# Altium footprint library SYNCBOX_TST.PcbLib: 267 footprints (part 4 of 17)
Each footprint in its own frame and in the unit in brackets; x right, y up, seen from the top. Pads: shape width x height; smd on the part's side, far side on the other; paste and mask are expansions set on the pad; w line width, h text height; cw(c..) or ccw(c..) is an arc to the next point about the centre after c.
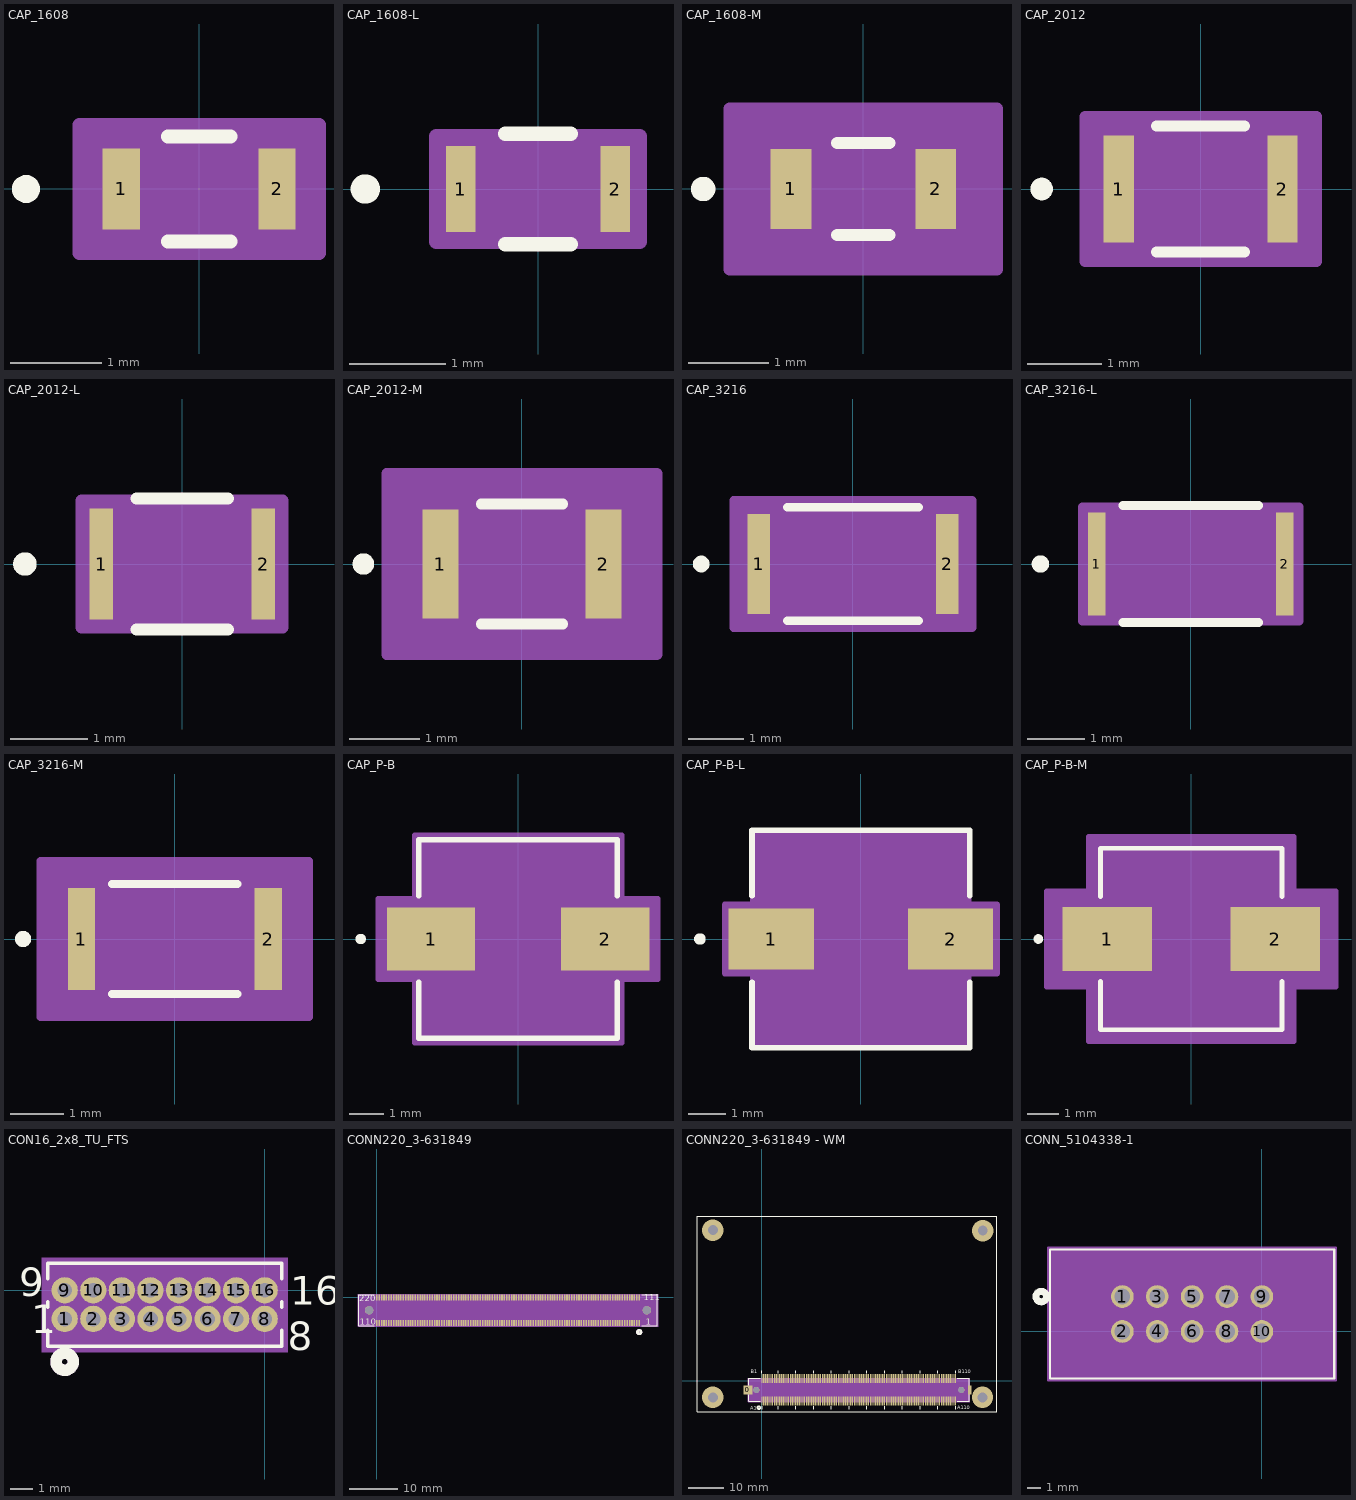
[diagram p3: the footprints below, top view; thin cyan lines are the x and y axes]

## CAP_1608 [mil]
pads (2):
  rect 16x35 smd paste+0 mask+0: 1(-33.5,0) 2(33.5,0)
Top Overlay:
  circle w6: c-74.5,0 r3
  lines w6: -13.39,-22.5 13.39,-22.5 ; -13.39,22.5 13.39,22.5
Mechanical 13:
  circle w0: c-28.5,0 r3
  lines w1: -33.5,-17.5 -33.5,17.5 ; -33.5,-17.5 33.5,-17.5 ; -33.5,-17.5 -25.5,-17.5 -25.5,17.5 -33.5,17.5 ; -33.5,-17.5 -33.5,17.5 ; -33.5,17.5 33.5,17.5 ; 33.5,-17.5 33.5,17.5 ; 33.5,-17.5 33.5,17.5 ; 33.5,-17.5 25.5,-17.5 25.5,17.5 33.5,17.5
Mechanical 15:
  region: 51.5,-27.5 -51.5,-27.5 -51.5,27.5 51.5,27.5
  lines w6: -51.5,-27.5 51.5,-27.5 51.5,27.5 -51.5,27.5 -51.5,-27.5
3D body: height 10, standoff 0, extent 0,0 10,10
3D body "CAP_1608.stp": height 35, standoff 0, extent -33.5,-17.48 33.5,17.48

## CAP_1608-L [mil]
pads (2):
  rect 12x35 smd paste+0 mask+0: 1(-31.5,0) 2(31.5,0)
Top Overlay:
  circle w6: c-70.5,0 r3
  lines w6: -13.39,-22.5 13.39,-22.5 ; -13.39,22.5 13.39,22.5
Mechanical 13:
  circle w0: c-26.5,0 r3
  lines w1: -33.5,-17.5 -33.5,17.5 ; -33.5,-17.5 -25.5,-17.5 -25.5,17.5 -33.5,17.5 ; -33.5,-17.5 33.5,-17.5 ; -33.5,-17.5 -33.5,17.5 ; -33.5,17.5 33.5,17.5 ; 33.5,-17.5 25.5,-17.5 25.5,17.5 33.5,17.5 ; 33.5,-17.5 33.5,17.5 ; 33.5,-17.5 33.5,17.5
Mechanical 15:
  region: 41.5,-21.5 -41.5,-21.5 -41.5,21.5 41.5,21.5
  lines w6: -41.5,-21.5 -41.5,21.5 41.5,21.5 41.5,-21.5 -41.5,-21.5
3D body "CAP_1608-L.stp": height 35, standoff 0, extent -33.5,-17.48 33.51,17.48
3D body: height 10, standoff 0, extent 0,0 10,10

## CAP_1608-M [mil]
pads (2):
  rect 20x39 smd paste+0 mask+0: 1(-35.5,0) 2(35.5,0)
Top Overlay:
  circle w6: c-78.5,0 r3
  lines w6: -12.75,-22.5 12.75,-22.5 ; -12.75,22.5 12.75,22.5
Mechanical 13:
  circle w0: c-30.5,0 r3
  lines w1: -33.5,-17.5 -33.5,17.5 ; -33.5,-17.5 -25.5,-17.5 -25.5,17.5 -33.5,17.5 ; -33.5,-17.5 33.5,-17.5 ; -33.5,-17.5 -33.5,17.5 ; -33.5,17.5 33.5,17.5 ; 33.5,-17.5 25.5,-17.5 25.5,17.5 33.5,17.5 ; 33.5,-17.5 33.5,17.5 ; 33.5,-17.5 33.5,17.5
Mechanical 15:
  region: 65.5,-39.5 -65.5,-39.5 -65.5,39.5 65.5,39.5
  lines w6: -65.5,-39.5 -65.5,39.5 65.5,39.5 65.5,-39.5 -65.5,-39.5
3D body "CAP_1608-M.stp": height 35, standoff 0, extent -33.5,-17.48 33.51,17.48
3D body: height 10, standoff 0, extent 0,0 10,10

## CAP_2012 [mil]
pads (2):
  rect 16x57 smd paste+0 mask+0: 1(-43.5,0) 2(43.5,0)
Top Overlay:
  circle w6: c-84.5,0 r3
  lines w6: -23.39,-33.5 23.39,-33.5 ; -23.39,33.5 23.39,33.5
Mechanical 13:
  circle w0: c-38.5,0 r3
  lines w1: -43.5,-28.5 -43.5,28.5 ; -43.5,-28.5 43.5,-28.5 ; -43.5,-28.5 -35.5,-28.5 -35.5,28.5 -43.5,28.5 ; -43.5,-28.5 -43.5,28.5 ; -43.5,28.5 43.5,28.5 ; 43.5,-28.5 43.5,28.5 ; 43.5,-28.5 43.5,28.5 ; 43.5,-28.5 35.5,-28.5 35.5,28.5 43.5,28.5
Mechanical 15:
  region: 61.5,-38.5 -61.5,-38.5 -61.5,38.5 61.5,38.5
  lines w6: -61.5,-38.5 61.5,-38.5 61.5,38.5 -61.5,38.5 -61.5,-38.5
3D body "CAP_2012.stp": height 49.02, standoff 0, extent -43.5,-28.5 43.5,28.5
3D body: height 10, standoff 0, extent 0,0 10,10

## CAP_2012-L [mil]
pads (2):
  rect 12x57 smd paste+0 mask+0: 1(-41.5,0) 2(41.5,0)
Top Overlay:
  circle w6: c-80.5,0 r3
  lines w6: -23.39,-33.5 23.39,-33.5 ; -23.39,33.5 23.39,33.5
Mechanical 13:
  circle w0: c-36.5,0 r3
  lines w1: -43.5,-28.5 -43.5,28.5 ; -43.5,-28.5 -35.5,-28.5 -35.5,28.5 -43.5,28.5 ; -43.5,-28.5 43.5,-28.5 ; -43.5,-28.5 -43.5,28.5 ; -43.5,28.5 43.5,28.5 ; 43.5,-28.5 35.5,-28.5 35.5,28.5 43.5,28.5 ; 43.5,-28.5 43.5,28.5 ; 43.5,-28.5 43.5,28.5
Mechanical 15:
  region: 51.5,-32.5 -51.5,-32.5 -51.5,32.5 51.5,32.5
  lines w6: -51.5,-32.5 -51.5,32.5 51.5,32.5 51.5,-32.5 -51.5,-32.5
3D body: height 10, standoff 0, extent 0,0 10,10
3D body "CAP_2012-L.stp": height 49.02, standoff 0, extent -43.5,-28.5 43.51,28.51

## CAP_2012-M [mil]
pads (2):
  rect 20x61 smd paste+0 mask+0: 1(-45.5,0) 2(45.5,0)
Top Overlay:
  circle w6: c-88.5,0 r3
  lines w6: -22.75,-33.5 22.75,-33.5 ; -22.75,33.5 22.75,33.5
Mechanical 13:
  circle w0: c-40.5,0 r3
  lines w1: -43.5,-28.5 -43.5,28.5 ; -43.5,-28.5 -35.5,-28.5 -35.5,28.5 -43.5,28.5 ; -43.5,-28.5 43.5,-28.5 ; -43.5,-28.5 -43.5,28.5 ; -43.5,28.5 43.5,28.5 ; 43.5,-28.5 35.5,-28.5 35.5,28.5 43.5,28.5 ; 43.5,-28.5 43.5,28.5 ; 43.5,-28.5 43.5,28.5
Mechanical 15:
  region: 75.5,-50.5 -75.5,-50.5 -75.5,50.5 75.5,50.5
  lines w6: -75.5,-50.5 -75.5,50.5 75.5,50.5 75.5,-50.5 -75.5,-50.5
3D body: height 10, standoff 0, extent 0,0 10,10
3D body "CAP_2012-M.stp": height 49.02, standoff 0, extent -43.5,-28.5 43.51,28.51

## CAP_3216 [mil]
pads (2):
  rect 16x71 smd paste+0 mask+0: 1(-67,0) 2(67,0)
Top Overlay:
  circle w6: c-108,0 r3
  lines w6: -46.89,-40.5 46.89,-40.5 ; -46.89,40.5 46.89,40.5
Mechanical 13:
  circle w0: c-62,0 r3
  lines w1: -67,-35.5 -67,35.5 ; -67,-35.5 67,-35.5 ; -67,-35.5 -59,-35.5 -59,35.5 -67,35.5 ; -67,-35.5 -67,35.5 ; -67,35.5 67,35.5 ; 67,-35.5 67,35.5 ; 67,-35.5 67,35.5 ; 67,-35.5 59,-35.5 59,35.5 67,35.5
Mechanical 15:
  region: 85,-45.5 -85,-45.5 -85,45.5 85,45.5
  lines w6: -85,-45.5 85,-45.5 85,45.5 -85,45.5 -85,-45.5
3D body "CAP_3216.stp": height 49.02, standoff 0, extent -67,-35.51 67.01,35.51
3D body: height 10, standoff 0, extent 0,0 10,10

## CAP_3216-L [mil]
pads (2):
  rect 12x71 smd paste+0 mask+0: 1(-65,0) 2(65,0)
Top Overlay:
  circle w6: c-104,0 r3
  lines w6: -46.89,-40.5 46.89,-40.5 ; -46.89,40.5 46.89,40.5
Mechanical 13:
  circle w0: c-60,0 r3
  lines w1: -67,-35.5 -67,35.5 ; -67,-35.5 67,-35.5 ; -67,-35.5 -59,-35.5 -59,35.5 -67,35.5 ; -67,-35.5 -67,35.5 ; -67,35.5 67,35.5 ; 67,-35.5 67,35.5 ; 67,-35.5 67,35.5 ; 67,-35.5 59,-35.5 59,35.5 67,35.5
Mechanical 15:
  region: 75,-39.5 -75,-39.5 -75,39.5 75,39.5
  lines w6: -75,-39.5 75,-39.5 75,39.5 -75,39.5 -75,-39.5
3D body "CAP_3216-L.stp": height 49.02, standoff 0, extent -67,-35.51 67.01,35.51
3D body: height 10, standoff 0, extent 0,0 10,10

## CAP_3216-M [mil]
pads (2):
  rect 20x75 smd paste+0 mask+0: 1(-69,0) 2(69,0)
Top Overlay:
  circle w6: c-112,0 r3
  lines w6: -46.25,-40.5 46.25,-40.5 ; -46.25,40.5 46.25,40.5
Mechanical 13:
  circle w0: c-64,0 r3
  lines w1: -67,-35.5 -67,35.5 ; -67,-35.5 67,-35.5 ; -67,-35.5 -59,-35.5 -59,35.5 -67,35.5 ; -67,-35.5 -67,35.5 ; -67,35.5 67,35.5 ; 67,-35.5 67,35.5 ; 67,-35.5 67,35.5 ; 67,-35.5 59,-35.5 59,35.5 67,35.5
Mechanical 15:
  region: 99,-57.5 -99,-57.5 -99,57.5 99,57.5
  lines w6: -99,-57.5 99,-57.5 99,57.5 -99,57.5 -99,-57.5
3D body: height 10, standoff 0, extent 0,0 10,10
3D body "CAP_3216-M.stp": height 49.02, standoff 0, extent -67,-35.51 67.01,35.51

## CAP_P-B [mil]
pads (2):
  rect 101x72 smd paste+0 mask+0: 1(-99.5,0) 2(99.5,0)
Top Overlay:
  circle w6: c-180,0 r3
  lines w6: -113.5,-49.1 -113.5,-113.5 113.5,-113.5 113.5,-49.1 ; -113.5,49.1 -113.5,113.5 113.5,113.5 113.5,49.1
Mechanical 13:
  circle w0: c-88.5,0 r3
  lines w1: -108.5,-54.25 -54.25,-108.5 ; -108.5,54.25 -54.25,108.5 ; -108.5,-108.5 108.5,-108.5 108.5,108.5 -108.5,108.5 -108.5,-108.5
Mechanical 15:
  region: -118.5,-46 -160,-46 -160,46 -118.5,46 -118.5,118.5 118.5,118.5 118.5,46 160,46 160,-46 118.5,-46 118.5,-118.5 -118.5,-118.5
  lines w6: -160,-46 -160,46 -118.5,46 -118.5,118.5 118.5,118.5 118.5,46 160,46 160,-46 118.5,-46 118.5,-118.5 -118.5,-118.5 -118.5,-46 -160,-46
3D body: height 10, standoff 0, extent 0,0 10,10
3D body "P-B.step": height 234.09, standoff 0, extent -122,-108.5 122.01,108.51

## CAP_P-B-L [mil]
pads (2):
  rect 89x64 smd paste+0 mask+0: 1(-93.5,0) 2(93.5,0)
Top Overlay:
  circle w6: c-168,0 r3
  lines w6: -113.5,-45.1 -113.5,-113.5 113.5,-113.5 113.5,-45.1 ; -113.5,45.1 -113.5,113.5 113.5,113.5 113.5,45.1
Mechanical 13:
  circle w0: c-88.5,0 r3
  lines w1: -108.5,-54.25 -54.25,-108.5 ; -108.5,54.25 -54.25,108.5 ; -108.5,-108.5 108.5,-108.5 108.5,108.5 -108.5,108.5 -108.5,-108.5
Mechanical 15:
  region: -112.5,-36 -142,-36 -142,36 -112.5,36 -112.5,112.5 112.5,112.5 112.5,36 142,36 142,-36 112.5,-36 112.5,-112.5 -112.5,-112.5
  lines w6: -142,-36 -142,36 -112.5,36 -112.5,112.5 112.5,112.5 112.5,36 142,36 142,-36 112.5,-36 112.5,-112.5 -112.5,-112.5 -112.5,-36 -142,-36
3D body: height 10, standoff 0, extent 0,0 10,10
3D body "P-B-L.step": height 234.09, standoff 0, extent -122,-108.5 122.01,108.5

## CAP_P-B-M [mil]
pads (2):
  rect 112x80 smd paste+0 mask+0: 1(-105,0) 2(105,0)
Top Overlay:
  circle w6: c-191,0 r3
  lines w6: -113.5,-53.1 -113.5,-113.5 113.5,-113.5 113.5,-53.1 ; -113.5,53.1 -113.5,113.5 113.5,113.5 113.5,53.1
Mechanical 13:
  circle w0: c-88.5,0 r3
  lines w1: -108.5,-54.25 -54.25,-108.5 ; -108.5,54.25 -54.25,108.5 ; -108.5,-108.5 -108.5,108.5 108.5,108.5 108.5,-108.5 -108.5,-108.5
Mechanical 15:
  region: -128.5,-60 -181,-60 -181,60 -128.5,60 -128.5,128.5 128.5,128.5 128.5,60 181,60 181,-60 128.5,-60 128.5,-128.5 -128.5,-128.5
  lines w6: -181,-60 -128.5,-60 -128.5,-128.5 128.5,-128.5 128.5,-60 181,-60 181,60 128.5,60 128.5,128.5 -128.5,128.5 -128.5,60 -181,60 -181,-60
3D body "P-B-M.step": height 234.09, standoff 0, extent -122,-108.5 122.01,108.51
3D body: height 10, standoff 0, extent 0,0 10,10

## CON16_2x8_TU_FTS [mil]
pads (16):
  round 46 hole 26: 1(-350,-50) 2(-300,-50) 3(-250,-50) 4(-200,-50) 5(-150,-50) 6(-100,-50) 7(-50,-50) 8(0,-50) 9(-350,0) 10(-300,0) 11(-250,0) 12(-200,0) 13(-150,0) 14(-100,0) 15(-50,0) 16(0,0)
Top Overlay:
  circle w20: c-350,-125 r15
  lines w6: -380,-70.08 -380,-98 30,-98 30,-70.08 ; -380,-29.92 -380,-20.08 ; -380,20.08 -380,47 30,47 30,20.08 ; 30,-29.92 30,-20.08
  text "1" at -408.5,-75 h50
  text "9" at -430,-10 h50
  text "8" at 40,-105 h50
  text "16" at 45,-25 h50
Bottom Overlay:
  circle w20: c-350,-125 r15
Mechanical 5:
  region: -390,57 40,57 40,-108 -390,-108
Mechanical 13:
  circle w20: c-350,-125 r15
  lines w1: -375,-93 25,-93 25,42 -375,42 -375,-93
  text "1" at -410,-75 h50
  text "9" at -430,-10 h50
  text "8" at 40,-105 h50
  text "16" at 45,-25 h50
Mechanical 15:
  region: 35,52 -385,52 -385,-103 35,-103
  lines w6: -385,-103 -385,52 35,52 35,-103 -385,-103
3D body: height 10, standoff 0, extent 0,0 10,10
3D body "CON16_2x8_TU_FTS.step": height 154.02, standoff -200, extent -375,-75 25,25

## CONN220_3-631849 [mil] "COMe without module mounted on."
pads (222):
  rect 13x47 smd paste+0 mask+0: 1(2145.67,-208.66) 2(2125.98,-208.66) 3(2106.3,-208.66) 4(2086.61,-208.66) 5(2066.93,-208.66) 6(2047.24,-208.66) 7(2027.56,-208.66) 8(2007.87,-208.66) 9(1988.19,-208.66) 10(1968.5,-208.66) 11(1948.82,-208.66) 12(1929.13,-208.66) 13(1909.45,-208.66) 14(1889.76,-208.66) 15(1870.08,-208.66) 16(1850.39,-208.66) 17(1830.71,-208.66) 18(1811.02,-208.66) 19(1791.34,-208.66) 20(1771.65,-208.66) 21(1751.97,-208.66) 22(1732.28,-208.66) 23(1712.6,-208.66) 24(1692.91,-208.66) 25(1673.23,-208.66) 26(1653.54,-208.66) 27(1633.86,-208.66) 28(1614.17,-208.66) 29(1594.49,-208.66) 30(1574.8,-208.66) 31(1555.12,-208.66) 32(1535.43,-208.66) 33(1515.75,-208.66) 34(1496.06,-208.66) 35(1476.38,-208.66) 36(1456.69,-208.66) 37(1437.01,-208.66) 38(1417.32,-208.66) 39(1397.64,-208.66) 40(1377.95,-208.66) 41(1358.27,-208.66) 42(1338.58,-208.66) 43(1318.9,-208.66) 44(1299.21,-208.66) 45(1279.53,-208.66) 46(1259.84,-208.66) 47(1240.16,-208.66) 48(1220.47,-208.66) 49(1200.79,-208.66) 50(1181.1,-208.66) 51(1161.42,-208.66) 52(1141.73,-208.66) 53(1122.05,-208.66) 54(1102.36,-208.66) 55(1082.68,-208.66) 56(1062.99,-208.66) 57(1043.31,-208.66) 58(1023.62,-208.66) 59(1003.94,-208.66) 60(984.25,-208.66) 61(964.57,-208.66) 62(944.88,-208.66) 63(925.2,-208.66) 64(905.51,-208.66) 65(885.83,-208.66) 66(866.14,-208.66) 67(846.46,-208.66) 68(826.77,-208.66) 69(807.09,-208.66) 70(787.4,-208.66) 71(767.72,-208.66) 72(748.03,-208.66) 73(728.35,-208.66) 74(708.66,-208.66) 75(688.98,-208.66) 76(669.29,-208.66) 77(649.61,-208.66) 78(629.92,-208.66) 79(610.24,-208.66) 80(590.55,-208.66) 81(570.87,-208.66) 82(551.18,-208.66) 83(531.5,-208.66) 84(511.81,-208.66) 85(492.13,-208.66) 86(472.44,-208.66) 87(452.76,-208.66) 88(433.07,-208.66) 89(413.39,-208.66) 90(393.7,-208.66) 91(374.02,-208.66) 92(354.33,-208.66) 93(334.65,-208.66) 94(314.96,-208.66) 95(295.28,-208.66) 96(275.59,-208.66) 97(255.91,-208.66) 98(236.22,-208.66) 99(216.54,-208.66) 100(196.85,-208.66) 101(177.17,-208.66) 102(157.48,-208.66) 103(137.8,-208.66) 104(118.11,-208.66) 105(98.43,-208.66) 106(78.74,-208.66) 107(59.06,-208.66) 108(39.37,-208.66) 109(19.69,-208.66) 110(0,-208.66) 111(2145.67,0) 112(2125.98,0) 113(2106.3,0) 114(2086.61,0) 115(2066.93,0) 116(2047.24,0) 117(2027.56,0) 118(2007.87,0) 119(1988.19,0) 120(1968.5,0) 121(1948.82,0) 122(1929.13,0) 123(1909.45,0) 124(1889.76,0) 125(1870.08,0) 126(1850.39,0) 127(1830.71,0) 128(1811.02,0) 129(1791.34,0) 130(1771.65,0) 131(1751.97,0) 132(1732.28,0) 133(1712.6,0) 134(1692.91,0) 135(1673.23,0) 136(1653.54,0) 137(1633.86,0) 138(1614.17,0) 139(1594.49,0) 140(1574.8,0) 141(1555.12,0) 142(1535.43,0) 143(1515.75,0) 144(1496.06,0) 145(1476.38,0) 146(1456.69,0) 147(1437.01,0) 148(1417.32,0) 149(1397.64,0) 150(1377.95,0) 151(1358.27,0) 152(1338.58,0) 153(1318.9,0) 154(1299.21,0) 155(1279.53,0) 156(1259.84,0) 157(1240.16,0) 158(1220.47,0) 159(1200.79,0) 160(1181.1,0) 161(1161.42,0) 162(1141.73,0) 163(1122.05,0) 164(1102.36,0) 165(1082.68,0) 166(1062.99,0) 167(1043.31,0) 168(1023.62,0) 169(1003.94,0) 170(984.25,0) 171(964.57,0) 172(944.88,0) 173(925.2,0) 174(905.51,0) 175(885.83,0) 176(866.14,0) 177(846.46,0) 178(826.77,0) 179(807.09,0) 180(787.4,0) 181(767.72,0) 182(748.03,0) 183(728.35,0) 184(708.66,0) 185(688.98,0) 186(669.29,0) 187(649.61,0) 188(629.92,0) 189(610.24,0) 190(590.55,0) 191(570.87,0) 192(551.18,0) 193(531.5,0) 194(511.81,0) 195(492.13,0) 196(472.44,0) 197(452.76,0) 198(433.07,0) 199(413.39,0) 200(393.7,0) 201(374.02,0) 202(354.33,0) 203(334.65,0) 204(314.96,0) 205(295.28,0) 206(275.59,0) 207(255.91,0) 208(236.22,0) 209(216.54,0) 210(196.85,0) 211(177.17,0) 212(157.48,0) 213(137.8,0) 214(118.11,0) 215(98.43,0) 216(78.74,0) 217(59.06,0) 218(39.37,0) 219(19.69,0) 220(0,0)
  round 69 / inner round 60 / far side round 69 hole 69: 221(-63.17,-104.33) 222(2208.83,-104.33)
Top Overlay:
  circle w20: c2145.67,-283.66 r15
  lines w6: -19.6,-231.33 -148.67,-231.33 -148.67,22.67 -19.6,22.67 ; 2165.27,-231.33 2294.33,-231.33 2294.33,22.67 2165.24,22.67
  text "220" at -142,-32 h50
  text "110" at -138,-224 h50
  text "111" at 2182.5,-25 h50
  text "1" at 2197.5,-225 h50
Mechanical 13:
  circle w20: c2145.67,-283.66 r15
  lines w1: -143.67,-226.33 -143.67,17.67 2289.33,17.67 2289.33,-226.33 -143.67,-226.33
  text "220" at -142,-33 h50
  text "110" at -138,-224 h50
  text "111" at 2182.5,-25 h50
  text "1" at 2197.5,-225 h50
Mechanical 15:
  region: 2299.33,27.67 -153.67,27.67 -153.67,-236.33 2299.33,-236.33
  lines w6: -153.67,-236.33 2299.33,-236.33 2299.33,27.67 -153.67,27.67 -153.67,-236.33
3D body "c-3-6318491-6-c1-3d.stp": height 292, standoff -24.93, extent -143.07,-224.05 2290,20.05
3D body: height 10, standoff 0, extent 0,0 10,10

## CONN220_3-631849 - WM [mil] "COMe with module mounted on."
pads (224):
  rect 100x100 smd: 0(-157,-104)
  rect 40x100 smd: 2(2300,-104)
  round 69 / inner round 60 / far side round 69 hole 69: 221(-63.17,-104.33) 222(2208.83,-104.33)
  rect 13x100 smd paste+0 mask+0: A1(0,-228.66) A2(19.69,-228.66) A3(39.37,-228.66) A4(59.06,-228.66) A5(78.74,-228.66) A6(98.43,-228.66) A7(118.11,-228.66) A8(137.8,-228.66) A9(157.48,-228.66) A10(177.17,-228.66) A11(196.85,-228.66) A12(216.54,-228.66) A13(236.22,-228.66) A14(255.91,-228.66) A15(275.59,-228.66) A16(295.28,-228.66) A17(314.96,-228.66) A18(334.65,-228.66) A19(354.33,-228.66) A20(374.02,-228.66) A21(393.7,-228.66) A22(413.39,-228.66) A23(433.07,-228.66) A24(452.76,-228.66) A25(472.44,-228.66) A26(492.13,-228.66) A27(511.81,-228.66) A28(531.5,-228.66) A29(551.18,-228.66) A30(570.87,-228.66) A31(590.55,-228.66) A32(610.24,-228.66) A33(629.92,-228.66) A34(649.61,-228.66) A35(669.29,-228.66) A36(688.98,-228.66) A37(708.66,-228.66) A38(728.35,-228.66) A39(748.03,-228.66) A40(767.72,-228.66) A41(787.4,-228.66) A42(807.09,-228.66) A43(826.77,-228.66) A44(846.46,-228.66) A45(866.14,-228.66) A46(885.83,-228.66) A47(905.51,-228.66) A48(925.2,-228.66) A49(944.88,-228.66) A50(964.57,-228.66) A51(984.25,-228.66) A52(1003.94,-228.66) A53(1023.62,-228.66) A54(1043.31,-228.66) A55(1062.99,-228.66) A56(1082.68,-228.66) A57(1102.36,-228.66) A58(1122.05,-228.66) A59(1141.73,-228.66) A60(1161.42,-228.66) A61(1181.1,-228.66) A62(1200.79,-228.66) A63(1220.47,-228.66) A64(1240.16,-228.66) A65(1259.84,-228.66) A66(1279.53,-228.66) A67(1299.21,-228.66) A68(1318.9,-228.66) A69(1338.58,-228.66) A70(1358.27,-228.66) A71(1377.95,-228.66) A72(1397.64,-228.66) A73(1417.32,-228.66) A74(1437.01,-228.66) A75(1456.69,-228.66) A76(1476.38,-228.66) A77(1496.06,-228.66) A78(1515.75,-228.66) A79(1535.43,-228.66) A80(1555.12,-228.66) A81(1574.8,-228.66) A82(1594.49,-228.66) A83(1614.17,-228.66) A84(1633.86,-228.66) A85(1653.54,-228.66) A86(1673.23,-228.66) A87(1692.91,-228.66) A88(1712.6,-228.66) A89(1732.28,-228.66) A90(1751.97,-228.66) A91(1771.65,-228.66) A92(1791.34,-228.66) A93(1811.02,-228.66) A94(1830.71,-228.66) A95(1850.39,-228.66) A96(1870.08,-228.66) A97(1889.76,-228.66) A98(1909.45,-228.66) A99(1929.13,-228.66) A100(1948.82,-228.66) A101(1968.5,-228.66) A102(1988.19,-228.66) A103(2007.87,-228.66) A104(2027.56,-228.66) A105(2047.24,-228.66) A106(2066.93,-228.66) A107(2086.61,-228.66) A108(2106.3,-228.66) A109(2125.98,-228.66) A110(2145.67,-228.66) B1(0,20) B2(19.69,20) B3(39.37,20) B4(59.06,20) B5(78.74,20) B6(98.43,20) B7(118.11,20) B8(137.8,20) B9(157.48,20) B10(177.17,20) B11(196.85,20) B12(216.54,20) B13(236.22,20) B14(255.91,20) B15(275.59,20) B16(295.28,20) B17(314.96,20) B18(334.65,20) B19(354.33,20) B20(374.02,20) B21(393.7,20) B22(413.39,20) B23(433.07,20) B24(452.76,20) B25(472.44,20) B26(492.13,20) B27(511.81,20) B28(531.5,20) B29(551.18,20) B30(570.87,20) B31(590.55,20) B32(610.24,20) B33(629.92,20) B34(649.61,20) B35(669.29,20) B36(688.98,20) B37(708.66,20) B38(728.35,20) B39(748.03,20) B40(767.72,20) B41(787.4,20) B42(807.09,20) B43(826.77,20) B44(846.46,20) B45(866.14,20) B46(885.83,20) B47(905.51,20) B48(925.2,20) B49(944.88,20) B50(964.57,20) B51(984.25,20) B52(1003.94,20) B53(1023.62,20) B54(1043.31,20) B55(1062.99,20) B56(1082.68,20) B57(1102.36,20) B58(1122.05,20) B59(1141.73,20) B60(1161.42,20) B61(1181.1,20) B62(1200.79,20) B63(1220.47,20) B64(1240.16,20) B65(1259.84,20) B66(1279.53,20) B67(1299.21,20) B68(1318.9,20) B69(1338.58,20) B70(1358.27,20) B71(1377.95,20) B72(1397.64,20) B73(1417.32,20) B74(1437.01,20) B75(1456.69,20) B76(1476.38,20) B77(1496.06,20) B78(1515.75,20) B79(1535.43,20) B80(1555.12,20) B81(1574.8,20) B82(1594.49,20) B83(1614.17,20) B84(1633.86,20) B85(1653.54,20) B86(1673.23,20) B87(1692.91,20) B88(1712.6,20) B89(1732.28,20) B90(1751.97,20) B91(1771.65,20) B92(1791.34,20) B93(1811.02,20) B94(1830.71,20) B95(1850.39,20) B96(1870.08,20) B97(1889.76,20) B98(1909.45,20) B99(1929.13,20) B100(1948.82,20) B101(1968.5,20) B102(1988.19,20) B103(2007.87,20) B104(2027.56,20) B105(2047.24,20) B106(2066.93,20) B107(2086.61,20) B108(2106.3,20) B109(2125.98,20) B110(2145.67,20)
via 2444.11,-187.01 diameter 236.22 hole 110.24
via -544,-187 diameter 236.22 hole 110.24
via 2446,1661 diameter 236.22 hole 110.24
via -544.77,1666.23 diameter 236.22 hole 110.24
Top Overlay:
  circle w20: c-34.33,-300.66 r15
  lines w4: 0,80 0,110 ; 0.7,-316 0.7,-286 ; 178,80 178,110 ; 178.7,-316 178.7,-286 ; 374.7,80 374.7,110 ; 375.4,-316 375.4,-286 ; 571.4,80 571.4,110 ; 572.1,-316 572.1,-286 ; 768.1,80 768.1,110 ; 768.8,-316 768.8,-286 ; 964.8,80 964.8,110 ; 965.5,-316 965.5,-286 ; 1161.5,80 1161.5,110 ; 1162.2,-316 1162.2,-286 ; 1358.2,80 1358.2,110 ; 1358.9,-316 1358.9,-286 ; 1554.9,80 1554.9,110 ; 1555.6,-316 1555.6,-286 ; 1751.6,80 1751.6,110 ; 1752.3,-316 1752.3,-286 ; 1948.3,80 1948.3,110 ; 1949,-316 1949,-286 ; 2145,80 2145,110 ; 2145.7,-316 2145.7,-286
  lines w6: -19.6,-231.33 -148.67,-231.33 -148.67,22.67 -19.6,22.67 ; 2165.27,-231.33 2294.33,-231.33 2294.33,22.67 2165.24,22.67 ; -720,-345 -720,1819 -712,1819 2604,1819 2604,-345 -720,-345
  text "B1" at -126,78 h40
  text "A1" at -128,-324 h40
  text "B110" at 2172,83 h40
  text "A110" at 2166,-320 h40
Mechanical 15:
  region: 2299.33,27.67 -153.67,27.67 -153.67,-236.33 2299.33,-236.33
  lines w6: -153.67,-236.33 2299.33,-236.33 2299.33,27.67 -153.67,27.67 -153.67,-236.33
3D body "COMe-mBT10_L112_R01.stp": height 588.9, standoff 266.14, extent -712.48,-345 2602.48,1820.35
3D body "c-3-6318491-6-c1-3d.stp": height 292, standoff -24.93, extent -143.07,-224.05 2290,20.05
3D body: height 10, standoff 0, extent 0,0 10,10
3D body: height 500, standoff -100, extent 2390.89,1605.89 2501.12,1716.12
3D body: height 500, standoff -100, extent -599.88,1611.12 -489.65,1721.35
3D body: height 500, standoff -100, extent -599.11,-242.11 -488.88,-131.87
3D body: height 500, standoff -100, extent 2389,-242.12 2499.24,-131.88

## CONN_5104338-1 [mil]
pads (10):
  round 65 / inner round 60 / far side round 65 hole 45 paste+0 mask+0: 1(-400,100) 2(-400,0) 3(-300,100) 4(-300,0) 5(-200,100) 6(-200,0) 7(-100,100) 8(-100,0) 9(0,100) 10(0,0)
Top Overlay:
  circle w20: c-632.5,100 r15
  lines w6: -607.5,-135 -607.5,235 207.5,235 207.5,-135 -607.5,-135
Bottom Overlay:
  circle w20: c-632.5,100 r15
Mechanical 13:
  circle w20: c-400,175 r15
  lines w1: -602.5,-130 -602.5,230 202.5,230 202.5,-130 -602.5,-130
Mechanical 15:
  region: 202.5,230 -602.5,230 -602.5,-130 202.5,-130
  region: 212.5,240 -612.5,240 -612.5,-140 212.5,-140
  lines w6: -612.5,-140 212.5,-140 212.5,240 -612.5,240 -612.5,-140
3D body "702461004.stp": height 289.96, standoff -210, extent -600,-125 200,225
3D body: height 10, standoff 0, extent 0,0 10,10